# Altium footprint library Card Connectors.PcbLib: 16 footprints
Each footprint in its own frame and in the unit in brackets; x right, y up, seen from the top. Pads: shape width x height; smd on the part's side, far side on the other; paste and mask are expansions set on the pad; w line width, h text height; cw(c..) or ccw(c..) is an arc to the next point about the centre after c.
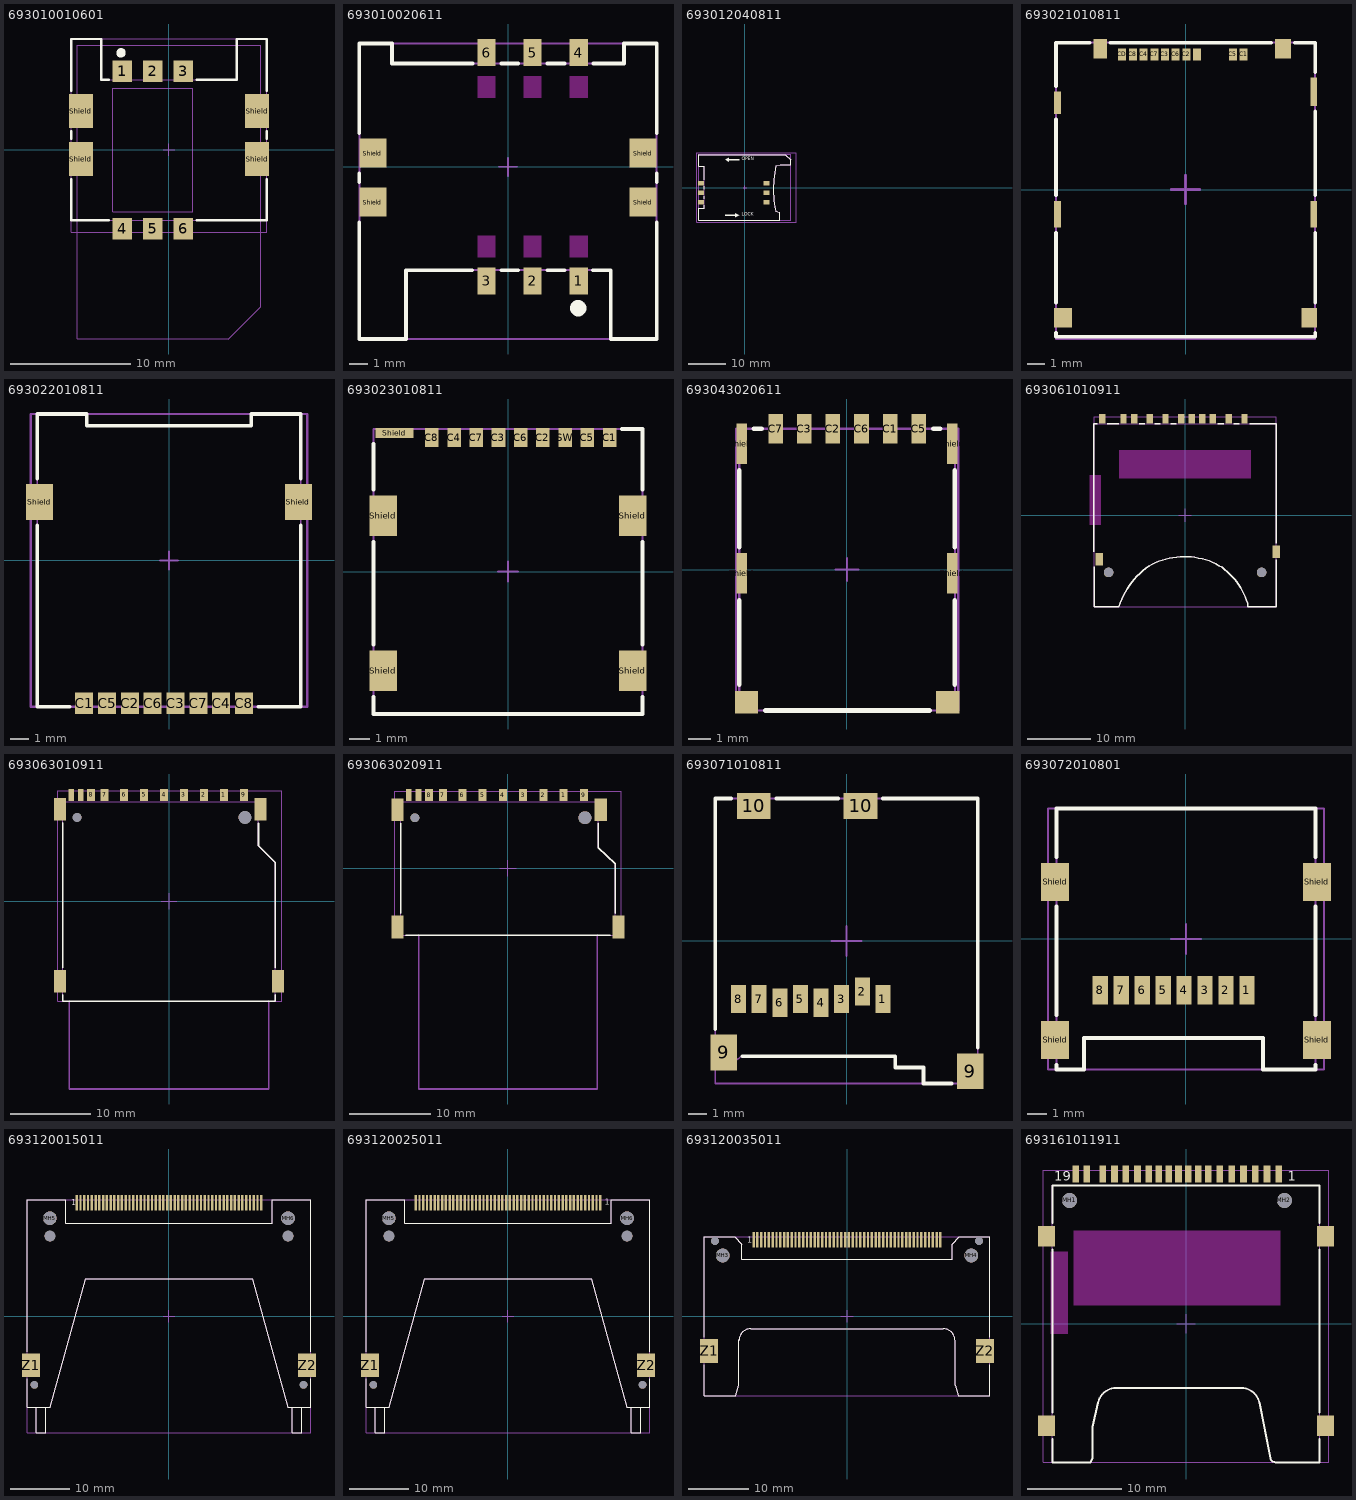
[diagram p0: the footprints below, top view; thin cyan lines are the x and y axes]

## 693010010601 [mm] "Mini SIM Card Connector Header"
height 1.7
pads (10):
  rect 1.6x1.8 smd: 1(-3.9,6.55) 2(-1.36,6.55) 3(1.18,6.55) 4(-3.9,-6.55) 5(-1.36,-6.55) 6(1.18,-6.55)
  rect 2x2.8 smd: Shield(-7.35,-0.75) Shield(-7.35,3.25) Shield(7.35,-0.75) Shield(7.35,3.25)
Top Overlay:
  circle w0.5: c-4,8.1 r0.141
  lines w0.2: -8.15,-2.45 -8.15,-5.85 -5,-5.85 ; -8.15,0.95 -8.15,1.55 ; -8.15,4.95 -8.15,9.25 -5.65,9.25 -5.65,5.85 -5,5.85 ; 2.3,-5.85 8.15,-5.85 8.15,-2.45 ; 2.3,5.85 5.65,5.85 5.65,9.25 8.15,9.25 8.15,4.95 ; 8.15,0.95 8.15,1.55
Mechanical 1:
  lines w0.1: -7.65,-15.75 -7.65,8.75 7.65,8.75 7.65,-13.05 4.95,-15.75 4.95,-15.75 ; -7.65,-15.75 -7.65,-15.75 ; -7.65,-15.75 4.95,-15.75 ; 4.95,-15.75 4.95,-15.75 ; -4.7,-5.15 1.98,-5.15 1.98,5.15 -4.7,5.15 -4.7,-5.15
  text "Via Limited Area" at -1,-4.5 h0.6
Mechanical 11:
  lines w0.1: -8.15,-5.85 -8.15,9.25 -5.65,9.25 -5.65,5.85 5.65,5.85 5.65,9.25 8.15,9.25 8.15,-5.85 -8.15,-5.85
Mechanical 13:
  lines w0.1: -8.15,-6.85 8.15,-6.85 8.15,9.25 -8.15,9.25 -8.15,-6.85
Mechanical 15:
  lines w0.1: -0.5,0 0.5,0 ; 0,-0.5 0,0.5
3D body "693010010601.stp": height 1.71, standoff -0.04, extent -8.15,-6.85 8.15,9.25

## 693010020611 [mm] "Mini SIM Card Connector Header Shielded"
height 1.8
pads (10):
  rect 1x1.5 smd: 1(3.9,-6.3) 2(1.36,-6.3) 3(-1.18,-6.3) 4(3.9,6.3) 5(1.36,6.3) 6(-1.18,6.3)
  rect 1.5x1.6 smd: Shield(-7.45,-1.95) Shield(-7.45,0.75) Shield(7.45,-1.95) Shield(7.45,0.75)
Top Layer keep-out:
  rectangle: 3.4,3.8 4.4,5
  rectangle: 0.86,3.8 1.86,5
  rectangle: -1.68,3.8 -0.68,5
  region: 4.4,-3.8 3.4,-3.8 3.4,-5 4.4,-5
  region: 1.86,-3.8 0.86,-3.8 0.86,-5 1.86,-5
  region: -0.68,-3.8 -1.68,-3.8 -1.68,-5 -0.68,-5
Top Overlay:
  circle w0.5: c3.87,-7.8 r0.2
  lines w0.2: -8.2,-3.05 -8.2,-9.5 -5.63,-9.5 -5.63,-5.7 -1.98,-5.7 ; -8.2,-0.85 -8.2,-0.35 ; -8.2,1.85 -8.2,6.8 -6.4,6.8 -6.4,5.7 -1.95,5.7 ; -0.38,-5.7 0.57,-5.7 ; -0.38,5.7 0.57,5.7 ; 2.17,-5.7 3.12,-5.7 ; 2.17,5.7 3.12,5.7 ; 4.67,-5.7 5.67,-5.7 5.67,-9.5 8.2,-9.5 8.2,-3.05 ; 4.7,5.7 6.4,5.7 6.4,6.8 8.2,6.8 8.2,1.85 ; 8.2,-0.85 8.2,-0.35
Mechanical 11:
  lines w0.1: -8.2,-9.5 -8.2,6.8 -6.4,6.8 -6.4,5.7 6.4,5.7 6.4,6.8 8.2,6.8 8.2,-9.5 5.67,-9.5 5.67,-5.7 -5.63,-5.7 -5.63,-9.5 ; -8.2,-9.5 -8.2,-9.5 ; -8.2,-9.5 -5.63,-9.5 ; -5.63,-9.5 -5.63,-9.5
Mechanical 13:
  lines w0.1: -8.2,-9.5 8.2,-9.5 ; -8.2,-9.5 -8.2,-9.5 ; -8.2,-9.5 -8.2,6.8 8.2,6.8 ; 8.2,-9.5 8.2,6.8 ; 8.2,-9.5 8.2,-9.5 ; 8.2,6.8 8.2,6.8
Mechanical 15:
  lines w0.1: -0.5,0 0.5,0 ; 0,-0.5 0,0.5
3D body "693010020611.stp": height 1.82, standoff -0.03, extent -8.2,-9.5 8.2,6.8

## 693012040811 [mm] "Mini SIM Card Connector, Hinge Type"
height 1.8
pads (6):
  rect 1.6x1.2 smd: C1(-11.75,-3.9) C2(-11.75,-1.36) C3(-11.75,1.18) C5(5.75,-3.9) C6(5.75,-1.36) C7(5.75,1.18)
Top Overlay:
  region: -5.3,7.4 -4.8,7.65 -4.3,7.9 -4.3,7.55 -1.55,7.55 -1.55,7.25 -4.3,7.25 -4.3,6.9 -4.8,7.4 -4.3,6.9
  region: -1.55,-7.4 -2.05,-7.65 -2.55,-7.9 -2.55,-7.55 -5.3,-7.55 -5.3,-7.25 -2.55,-7.25 -2.55,-6.9 -2.05,-7.4 -2.55,-6.9
  lines w0.2: -10.9,-4.77 -10.9,-5.52 -12.3,-5.52 -12.3,-8.8 9.25,-8.8 9.25,-6.55 8.255,-6.374 cw(c34.968,0.127) 7.994,-5.191 cw(c37.494,-0.397) 8.252,5.778 ; -10.9,-3.02 -10.9,-2.27 ; -10.9,-0.47 -10.9,0.28 ; -10.9,2.08 -10.9,5.62 -12.3,5.62 -12.3,8.8 10.85,8.8 12.302,7.397 12.302,6.148 9.45,6.148 8.251,5.781
  text "OPEN" at -0.9,6.9 h1.5
  text "LOCK" at -0.9,-7.9 h1.5
Mechanical 11:
  lines w0.1: -12.3,-8.8 -12.3,-5.52 -10.9,-5.52 -10.9,5.62 -12.3,5.62 -12.3,8.8 ; -12.28,-8.8 9.25,-8.8 9.25,-6.55 8.255,-6.374 cw(c34.968,0.127) 7.994,-5.191 cw(c37.494,-0.397) 8.252,5.778 ; -12.28,8.8 10.85,8.8 12.302,7.397 12.302,6.148 9.45,6.148 8.251,5.781
Mechanical 13:
  lines w0.1: -12.3,-8.8 12.3,-8.8 12.3,8.918 -12.3,8.918 -12.3,-8.8
Mechanical 15:
  lines w0.1: -0.5,0 0.5,0 ; 0,-0.5 0,0.5 ; -12.8,-9.35 -12.8,9.35 13.7,9.35 13.7,-9.35 -12.8,-9.35
3D body "693012040811.stp": height 1.85, standoff -0.04, extent -12.3,-8.8 12.3,8.918

## 693021010811 [mm] "Micro SIM Card Connector, Push & Push"
height 1.4
pads (18):
  rect 0.45x0.68 smd: C1(3.25,7.565) C2(0.05,7.565) C3(-1.15,7.565) C4(-2.35,7.565) C5(2.65,7.565) C6(-0.55,7.565) C7(-1.75,7.565) C8(-2.95,7.565) CD(-3.55,7.565) COM(0.65,7.565)
  rect 0.37x1.5 smd: Shield(-7.165,-1.375) Shield(7.165,-1.375)
  rect 0.37x1.25 smd: Shield(-7.165,4.85)
  rect 1x1.1 smd: Shield(-6.85,-7.175)
  rect 0.75x1.1 smd: Shield(-4.77,7.875)
  rect 0.9x1.1 smd: Shield(5.46,7.875)
  rect 0.85x1.1 smd: Shield(6.925,-7.175)
  rect 0.37x1.6 smd: Shield(7.165,5.485)
Top Overlay:
  lines w0.2: -7.25,-8.025 -7.25,-8.225 7.25,-8.225 7.25,-8.025 ; -7.25,-6.325 -7.25,-2.425 ; -7.25,-0.325 -7.25,3.925 ; -7.25,5.775 -7.25,8.225 -5.35,8.225 ; -4.2,8.225 4.8,8.225 ; 6.1,8.225 7.25,8.225 7.25,6.575 ; 7.25,-6.325 7.25,-2.425 ; 7.25,-0.325 7.25,4.375
Mechanical 11:
  lines w0.1: -7.25,8.225 -7.25,8.225 ; -7.25,8.225 -7.25,-8.225 7.25,-8.225 ; -7.25,8.225 7.25,8.225 7.25,-8.225 ; 7.25,-8.225 7.25,-8.225
Mechanical 13:
  lines w0.1: -7.25,-8.359 7.25,-8.359 7.25,8.225 -7.25,8.225 -7.25,-8.359
Mechanical 15:
  lines w0.15: -0.8,0 0.8,0 ; 0,-0.8 0,0.8
3D body "693021010811.stp": height 1.33, standoff -0.01, extent -7.25,-8.359 7.25,8.225

## 693022010811 [mm] "Micro SIM Card Connector, Hinge Type"
height 2
pads (10):
  rect 1x1.2 smd: C1(-4.72,-7.95) C2(-2.18,-7.95) C3(0.36,-7.95) C4(2.9,-7.95) C5(-3.45,-7.95) C6(-0.91,-7.95) C7(1.63,-7.95) C8(4.17,-7.95)
  rect 1.5x2 smd: Shield(-7.2,3.25) Shield(7.2,3.25)
Top Overlay:
  lines w0.2: -7.33,1.95 -7.33,-8.15 -5.53,-8.15 ; -7.33,4.55 -7.33,8.15 -4.58,8.15 -4.58,7.5 4.58,7.5 4.58,8.15 7.33,8.15 7.33,4.55 ; 4.97,-8.15 7.33,-8.15 7.33,1.95
Mechanical 11:
  lines w0.1: -7.33,-8.15 7.33,-8.15 7.33,8.15 4.58,8.15 4.58,7.5 -4.58,7.5 -4.58,8.15 -7.33,8.15 -7.33,-8.15
Mechanical 13:
  lines w0.127: -7.7,-8.15 7.7,-8.15 7.7,8.15 -7.7,8.15 -7.7,-8.15
Mechanical 15:
  lines w0.1: -0.5,0 0.5,0 ; 0,-0.5 0,0.5
3D body "693022010811.stp": height 2.09, standoff -0.04, extent -7.7,-8.16 7.7,8.14

## 693023010811 [mm] "Micro SIM Card Connector, Push & Pull"
height 1.27
pads (14):
  rect 0.67x0.95 smd: C1(5.03,6.625) C2(1.73,6.625) C3(-0.47,6.625) C4(-2.67,6.625) C5(3.93,6.625) C6(0.63,6.625) C7(-1.57,6.625) C8(-3.77,6.625) SW(2.83,6.625)
  rect 1.35x2 smd: Shield(-6.175,-4.9) Shield(-6.175,2.75) Shield(6.175,-4.9) Shield(6.175,2.75)
  rect 1.89x0.5 smd: Shield(-5.615,6.85)
Top Overlay:
  lines w0.2: -6.65,-6.2 -6.65,-7.05 6.65,-7.05 6.65,-6.2 ; -6.65,-3.6 -6.65,1.45 ; -6.65,4.05 -6.65,6.3 ; 5.65,7.05 6.65,7.05 6.65,4.05 ; 6.65,-3.6 6.65,1.45
Mechanical 11:
  lines w0.1: -6.65,-7.05 -6.65,7.05 6.65,7.05 6.65,-7.05 -6.65,-7.05
Mechanical 13:
  lines w0.1: -6.65,-7.05 6.65,-7.05 6.65,7.05 -6.65,7.05 -6.65,-7.05
Mechanical 15:
  lines w0.1: -0.5,0 0.5,0 ; 0,-0.5 0,0.5
3D body "693023010811.stp": height 1.3, standoff 0.03, extent -6.65,-7.05 6.65,7.05

## 693043020611 [mm] "Nano SIM Card Connector, Push & Pull"
height 1.3
pads (12):
  rect 0.65x1.3 smd: C1(1.915,6.25) C2(-0.625,6.25) C3(-1.895,6.25) C5(3.185,6.25) C6(0.645,6.25) C7(-3.165,6.25)
  rect 0.48x1.8 smd: Shield(-4.665,-0.17) Shield(-4.665,5.58) Shield(4.665,-0.17) Shield(4.665,5.58)
  rect 1.03x1 smd: Shield(-4.46,-5.89) Shield(4.47,-5.89)
Top Overlay:
  lines w0.2: -4.775,-5.1 -4.775,-1.35 ; -4.775,1 -4.775,4.4 ; -4.125,6.25 -3.775,6.25 ; -3.625,-6.25 3.675,-6.25 ; 3.825,6.25 4.125,6.25 ; 4.785,-5.1 4.785,-1.35 ; 4.785,1 4.785,4.4
Mechanical 11:
  lines w0.1: -4.775,-6.25 4.785,-6.25 4.785,6.25 -4.775,6.25 -4.775,-6.25
Mechanical 13:
  lines w0.1: -4.926,-6.25 4.936,-6.25 4.936,6.25 -4.926,6.25 -4.926,-6.25
Mechanical 15:
  lines w0.1: -0.5,0 0.5,0 ; 0,-0.5 0,0.5
3D body "693043020611.stp": height 1.2, standoff -0.01, extent -4.926,-6.25 4.936,6.25

## 693061010911 [mm] "SD Card Connector, Push & Push"
height 2.9
pads (15):
  rect 1x1.5 smd: 1(6.9,15.26) 2(4.4,15.26) 3(1.05,15.26) 4(-0.6,15.26) 5(-3.1,15.26) 6(-5.6,15.26) 7(-8.03,15.26) 8(-9.73,15.26) 9(9.4,15.26) CD(2.7,15.26) WP(-13.08,15.26)
  round 1.5 hole 1.5 unplated: MH1(-12.1,-9.05) MH2(12.1,-9.05)
  rect 1.2x2 smd: Shield(-13.6,-6.95) Shield(14.4,-5.75)
Top Layer keep-out:
  rectangle: -10.41,5.8 10.42,10.3
  rectangle: -15.1,-1.55 -13.3,6.4
Top Overlay:
  lines w0.2: -14.45,-5.75 -14.45,14.45 -13.85,14.45 ; -14.4,-8.15 -14.4,-14.45 -10.5,-14.45 cw(c1.7,-18.565) -5.714,-8.039 cw(c-0.104,-17.856) 5.867,-8.253 cw(c-0.726,-17.21) 9.893,-13.905 ; -12.3,14.45 -10.5,14.45 ; -7.25,14.45 -6.4,14.45 ; -4.8,14.45 -3.9,14.45 ; -2.3,14.45 -1.4,14.45 ; 5.2,14.45 6.1,14.45 ; 7.7,14.45 8.6,14.45 ; 9.9,-13.902 9.9,-14.45 14.4,-14.45 14.4,-7.05 ; 10.2,14.45 14.4,14.45 14.4,-4.45
Mechanical 11:
  lines w0.1: 9.893,-13.905 ccw(c-0.726,-17.21) 5.867,-8.253 ccw(c-0.104,-17.856) -5.714,-8.039 ccw(c1.7,-18.565) -10.5,-14.45 -14.4,-14.45 -14.4,14.45 14.4,14.45 14.4,-14.45 9.9,-14.45 9.9,-13.902
Mechanical 13:
  lines w0.1: -14.4,-14.45 14.4,-14.45 14.4,15.6 -14.4,15.6 -14.4,-14.45
Mechanical 15:
  lines w0.1: -1,0 1,0 ; 0,-1 0,1
3D body "693061010911.stp": height 2.94, standoff -0.46, extent -14.4,-14.45 14.4,15.6

## 693063010911 [mm] "SD Card Connector, Push & Pull"
height 3.3
pads (17):
  rect 1x1.5 smd: 1(6.875,13.3) 2(4.375,13.3) 3(1.875,13.3) 4(-0.625,13.3) 5(-3.125,13.3) 6(-5.625,13.3) 7(-8.05,13.3) 8(-9.75,13.3) 9(9.375,13.3)
  rect 0.7x1.5 smd: CD(-11.05,13.3) WP(-12.25,13.3)
  round 1.1 hole 1.1 unplated: MH1(-11.5,10.5)
  round 1.6 hole 1.6 unplated: MH2(9.5,10.5)
  rect 1.5x2.8 smd: Shield(-13.65,-10) Shield(-13.65,11.5) Shield(11.45,11.5) Shield(13.65,-10)
Top Overlay:
  lines w0.2: -13.3,-11.7 -13.3,-12.5 13.3,-12.5 13.3,-11.7 ; -13.3,-8.3 -13.3,9.8 ; 11.2,9.78 11.2,6.95 13.3,4.85 13.3,-8.3
Mechanical 1:
  lines w0.2: -12.5,-12.5 -12.5,-23.5 12.5,-23.5 12.5,-12.5
  text "Card Position" at -7,-19 h2.5
Mechanical 11:
  lines w0.1: -13.3,-12.5 -13.3,12.48 11.2,12.48 11.2,6.95 13.3,4.85 13.3,-12.5 -13.3,-12.5
Mechanical 13:
  lines w0.1: -13.95,-12.5 14.094,-12.5 14.094,13.8 -13.95,13.8 -13.95,-12.5
Mechanical 15:
  lines w0.1: -1,0 1,0 ; 0,-1 0,1
3D body "693063010911.stp": height 3.33, standoff -0.77, extent -13.95,-12.5 14.094,13.8

## 693063020911 [mm] "SD Card Connector, Push & Pull - Short Type"
height 2.8
pads (17):
  rect 1x1.5 smd: 1(6.875,9.05) 2(4.375,9.05) 3(1.875,9.05) 4(-0.625,9.05) 5(-3.125,9.05) 6(-5.625,9.05) 7(-8.05,9.05) 8(-9.75,9.05) 9(9.375,9.05)
  rect 0.7x1.5 smd: CD(-11.05,9.05) WP(-12.25,9.05)
  round 1.1 hole 1.1 unplated: MH1(-11.5,6.25)
  round 1.6 hole 1.6 unplated: MH2(9.5,6.25)
  rect 1.5x2.8 smd: Shield(-13.65,-7.25) Shield(-13.65,7.25) Shield(11.45,7.25) Shield(13.65,-7.25)
Top Overlay:
  lines w0.2: -13.25,-5.55 -13.25,5.55 ; -12.6,-8.25 12.6,-8.25 ; 11.15,5.55 11.15,2.55 13.254,0.554 13.254,-5.546
Mechanical 1:
  lines w0.2: -11,-8.25 -11,-27.25 11,-27.25 11,-8.25
  text "SD CARD" at -5,-18.05 h2.5
Mechanical 11:
  lines w0.1: 13.25,0.55 13.25,-8.25 -13.25,-8.25 -13.25,8.25 11.15,8.25 11.15,2.55 13.254,0.554
Mechanical 13:
  lines w0.1: -14,-8.247 14,-8.247 14,9.503 -14,9.503 -14,-8.247
Mechanical 15:
  lines w0.1: -1,0 1,0 ; 0,-1 0,1
3D body "693063020911.stp": height 2.82, standoff -0.83, extent -14,-8.247 14,9.503

## 693071010811 [mm] "Micro SD Card Connector, Push & Push"
height 1.98
pads (12):
  rect 0.8x1.5 smd: 1(1.94,-3.1) 2(0.84,-2.7) 3(-0.26,-3.1) 4(-1.36,-3.3) 5(-2.46,-3.1) 6(-3.56,-3.3) 7(-4.66,-3.1) 8(-5.76,-3.1)
  rect 1.4x1.9 smd: 9(-6.55,-5.95) 9(6.6,-6.95)
  rect 1.8x1.4 smd: 10(-4.95,7.2) 10(0.75,7.2)
Top Overlay:
  lines w0.2: -7,-4.7 -7,7.6 -6.15,7.6 ; -5.55,-6.15 2.6,-6.15 2.6,-6.75 4.1,-6.75 4.1,-7.6 5.6,-7.6 ; -3.75,7.6 -0.45,7.6 ; 1.95,7.6 7,7.6 7,-5.7
Mechanical 11:
  lines w0.1: -6.2,-6.6 -7,-6.6 -7,7.6 7,7.6 7,-7.6 4.1,-7.6 4.1,-6.75 2.6,-6.75 2.6,-6.15 -5.6,-6.15 -6.199,-6.601
Mechanical 13:
  lines w0.1: -7,-7.61 7,-7.61 7,7.6 -7,7.6 -7,-7.61
Mechanical 15:
  lines w0.1: -0.8,0 0.8,0 ; 0,-0.8 0,0.8
3D body "693071010811.stp": height 1.85, standoff -0.05, extent -7,-7.61 7,7.6

## 693072010801 [mm] "Micro SD Card Connector, Hinge Type"
height 1.95
pads (12):
  rect 0.8x1.5 smd: 1(3.2,-2.7) 2(2.1,-2.7) 3(1,-2.7) 4(-0.1,-2.7) 5(-1.2,-2.7) 6(-2.3,-2.7) 7(-3.4,-2.7) 8(-4.5,-2.7)
  rect 1.45x2 smd: Shield(-6.875,-5.3) Shield(-6.875,3) Shield(6.875,-5.3) Shield(6.875,3)
Top Overlay:
  lines w0.2: -6.8,-6.6 -6.8,-6.85 -5.35,-6.85 -5.35,-5.2 4.05,-5.2 4.05,-6.85 6.8,-6.85 6.8,-6.6 ; -6.8,-4 -6.8,1.7 ; -6.8,4.3 -6.8,6.85 6.8,6.85 6.8,4.3 ; 6.8,-4 6.8,1.7
Mechanical 11:
  lines w0.1: -6.8,-6.85 -6.8,6.85 6.8,6.85 6.8,-6.85 4.05,-6.85 4.05,-5.2 -5.35,-5.2 -5.35,-6.85 -6.8,-6.85
Mechanical 13:
  lines w0.1: -7.25,-6.85 7.25,-6.85 7.25,6.85 -7.25,6.85 -7.25,-6.85
Mechanical 15:
  lines w0.1: -0.8,0 0.8,0 ; 0,-0.8 0,0.8
3D body "693072010801.stp": height 1.79, standoff 0.02, extent -7.25,-6.85 7.25,6.85

## 693120015011 [mm] "Compact Flash Card Connector Header"
height 7.05
pads (58):
  rect 0.4x2.6 smd: 1(-15.557,19.145) 2(-14.287,19.145) 3(-13.018,19.145) 4(-11.747,19.145) 5(-10.477,19.145) 6(-9.207,19.145) 7(-7.938,19.145) 8(-6.667,19.145) 9(-5.397,19.145) 10(-4.127,19.145) 11(-2.857,19.145) 12(-1.587,19.145) 13(-0.318,19.145) 14(0.953,19.145) 15(2.222,19.145) 16(3.492,19.145) 17(4.763,19.145) 18(6.032,19.145) 19(7.302,19.145) 20(8.572,19.145) 21(9.842,19.145) 22(11.112,19.145) 23(12.383,19.145) 24(13.652,19.145) 25(14.922,19.145) 26(-14.922,19.145) 27(-13.652,19.145) 28(-12.383,19.145) 29(-11.112,19.145) 30(-9.842,19.145) 31(-8.572,19.145) 32(-7.302,19.145) 33(-6.032,19.145) 34(-4.763,19.145) 35(-3.492,19.145) 36(-2.222,19.145) 37(-0.953,19.145) 38(0.318,19.145) 39(1.587,19.145) 40(2.857,19.145) 41(4.127,19.145) 42(5.397,19.145) 43(6.667,19.145) 44(7.938,19.145) 45(9.207,19.145) 46(10.477,19.145) 47(11.747,19.145) 48(13.018,19.145) 49(14.287,19.145) 50(15.557,19.145)
  round 1.3 hole 1.3 unplated: MH1(-22.7,-11.555) MH2(22.7,-11.555)
  round 1.8 hole 1.8 unplated: MH3(-20.08,13.545) MH4(20.08,13.545)
  round 2.3 hole 2.3 unplated: MH5(-20.08,16.545) MH6(20.08,16.545)
  rect 3x4 smd: Z1(-23.295,-8.255) Z2(23.3,-8.255)
Top Overlay:
  lines w0.2: -23.9,-10.555 -23.9,-15.355 -20,-15.355 -14.019,6.355 ; -23.9,-5.955 -23.9,19.645 -17.45,19.645 -17.45,15.745 17.45,15.745 17.45,19.645 23.9,19.645 23.9,-5.955 ; -22.35,-15.355 -22.35,-19.645 -20.75,-19.645 -20.75,-15.355 ; -14.019,6.355 14.019,6.355 ; 14.019,6.355 20,-15.355 23.9,-15.355 23.9,-10.555 ; 20.75,-15.355 20.75,-19.645 22.35,-19.645 22.35,-15.355
  text "1" at -16.5,18.7 h1
Mechanical 11:
  lines w0.1: -22.35,-15.355 -22.35,-19.645 -20.75,-19.645 -20.75,-15.355 ; -14.019,6.355 14.019,6.355 ; -14.019,6.355 -20,-15.355 -23.9,-15.355 -23.9,19.645 -17.45,19.645 -17.45,15.745 17.45,15.745 17.45,19.645 23.9,19.645 23.9,-15.355 20,-15.355 14.019,6.355 ; 20.75,-15.355 20.75,-19.645 22.35,-19.645 22.35,-15.355
Mechanical 13:
  lines w0.1: -23.9,-19.645 23.9,-19.645 23.9,19.68 -23.9,19.68 -23.9,-19.645
Mechanical 15:
  lines w0.1: -1,0 1,0 ; 0,-1 0,1
3D body "693120015011.stp": height 6.32, standoff -0.73, extent -23.9,-19.645 23.9,19.68

## 693120025011 [mm] "Compact Flash Card Connector Header, Reverse type"
height 6.3
pads (58):
  rect 0.4x2.6 smd: 1(15.557,19.145) 2(14.287,19.145) 3(13.018,19.145) 4(11.747,19.145) 5(10.477,19.145) 6(9.207,19.145) 7(7.938,19.145) 8(6.667,19.145) 9(5.397,19.145) 10(4.127,19.145) 11(2.857,19.145) 12(1.587,19.145) 13(0.318,19.145) 14(-0.953,19.145) 15(-2.222,19.145) 16(-3.492,19.145) 17(-4.763,19.145) 18(-6.032,19.145) 19(-7.302,19.145) 20(-8.572,19.145) 21(-9.842,19.145) 22(-11.112,19.145) 23(-12.383,19.145) 24(-13.652,19.145) 25(-14.922,19.145) 26(14.922,19.145) 27(13.652,19.145) 28(12.383,19.145) 29(11.112,19.145) 30(9.842,19.145) 31(8.572,19.145) 32(7.302,19.145) 33(6.032,19.145) 34(4.763,19.145) 35(3.492,19.145) 36(2.222,19.145) 37(0.953,19.145) 38(-0.318,19.145) 39(-1.587,19.145) 40(-2.857,19.145) 41(-4.127,19.145) 42(-5.397,19.145) 43(-6.667,19.145) 44(-7.938,19.145) 45(-9.207,19.145) 46(-10.477,19.145) 47(-11.747,19.145) 48(-13.018,19.145) 49(-14.287,19.145) 50(-15.557,19.145)
  round 1.3 hole 1.3 unplated: MH1(-22.7,-11.555) MH2(22.7,-11.555)
  round 1.8 hole 1.8 unplated: MH3(-20.08,13.545) MH4(20.08,13.545)
  round 2.3 hole 2.3 unplated: MH5(-20.08,16.545) MH6(20.08,16.545)
  rect 3x4 smd: Z1(-23.295,-8.255) Z2(23.3,-8.255)
Top Overlay:
  lines w0.2: -23.9,-10.555 -23.9,-15.355 -20,-15.355 -14.019,6.355 ; -23.9,-5.955 -23.9,19.645 -17.45,19.645 -17.45,15.745 17.45,15.745 17.45,19.645 23.9,19.645 23.9,-5.955 ; -22.35,-15.355 -22.35,-19.645 -20.75,-19.645 -20.75,-15.355 ; -14.019,6.355 14.019,6.355 ; 14.019,6.355 20,-15.355 23.9,-15.355 23.9,-10.555 ; 20.75,-15.355 20.75,-19.645 22.35,-19.645 22.35,-15.355
  text "1" at 16.3,18.8 h1
Mechanical 11:
  lines w0.1: -22.35,-15.355 -22.35,-19.645 -20.75,-19.645 -20.75,-15.355 ; -14.019,6.355 14.019,6.355 ; -14.019,6.355 -20,-15.355 -23.9,-15.355 -23.9,19.645 -17.45,19.645 -17.45,15.745 17.45,15.745 17.45,19.645 23.9,19.645 23.9,-15.355 20,-15.355 14.019,6.355 ; 20.75,-15.355 20.75,-19.645 22.35,-19.645 22.35,-15.355
Mechanical 13:
  lines w0.1: -23.9,-19.645 -23.9,19.68 23.9,19.68 23.9,-19.645 -23.9,-19.645
Mechanical 15:
  lines w0.1: -1,0 1,0 ; 0,-1 0,1
3D body "693120025011.stp": height 6.32, standoff -0.73, extent -23.9,-19.645 23.9,19.691

## 693120035011 [mm] "Compact Flash Card Connector Header, Shrouded type"
height 6.8
pads (56):
  rect 0.4x2.6 smd: 1(-15.558,12.75) 2(-14.288,12.75) 3(-13.018,12.75) 4(-11.748,12.75) 5(-10.478,12.75) 6(-9.208,12.75) 7(-7.938,12.75) 8(-6.668,12.75) 9(-5.398,12.75) 10(-4.128,12.75) 11(-2.858,12.75) 12(-1.588,12.75) 13(-0.318,12.75) 14(0.952,12.75) 15(2.222,12.75) 16(3.492,12.75) 17(4.762,12.75) 18(6.032,12.75) 19(7.302,12.75) 20(8.572,12.75) 21(9.842,12.75) 22(11.112,12.75) 23(12.382,12.75) 24(13.652,12.75) 25(14.922,12.75) 26(-14.923,12.75) 27(-13.653,12.75) 28(-12.383,12.75) 29(-11.113,12.75) 30(-9.843,12.75) 31(-8.573,12.75) 32(-7.303,12.75) 33(-6.033,12.75) 34(-4.763,12.75) 35(-3.493,12.75) 36(-2.223,12.75) 37(-0.953,12.75) 38(0.317,12.75) 39(1.587,12.75) 40(2.857,12.75) 41(4.127,12.75) 42(5.397,12.75) 43(6.667,12.75) 44(7.937,12.75) 45(9.207,12.75) 46(10.477,12.75) 47(11.747,12.75) 48(13.017,12.75) 49(14.287,12.75) 50(15.557,12.75)
  round 1.3 hole 1.3 unplated: MH1(-22,12.55) MH2(22,12.55)
  round 2.3 hole 2.3 unplated: MH3(-20.7,10.15) MH4(20.7,10.15)
  rect 3x4 smd: Z1(-22.98,-5.75) Z2(22.98,-5.75)
Top Overlay:
  lines w0.2: -23.8,-8.05 -23.8,-13.25 -18.5,-13.25 ; -23.8,-3.45 -23.8,13.25 -18.7,13.25 -17.5,12.05 -17.5,9.55 17.5,9.55 17.5,12.05 18.7,13.25 23.8,13.25 23.8,-3.45 ; -18.502,-13.249 -18,-11.45 -18,-3.85 ; -18,-4.05 cw(c-16,-4.05) -16,-2.05 16,-2.05 cw(c16,-4.05) 18,-4.05 18,-11.45 18.502,-13.249 ; 18.5,-13.25 23.8,-13.25 23.8,-8.05
  text "1" at -16.6,12.3 h1
Mechanical 11:
  lines w0.1: -18.502,-13.249 -18,-11.45 -18,-3.85 ; -18.5,-13.25 -23.8,-13.25 -23.8,13.25 -18.7,13.25 -17.5,12.05 -17.5,9.55 17.5,9.55 17.5,12.05 18.7,13.25 23.8,13.25 23.8,-13.25 18.5,-13.25 ; -18,-4.05 cw(c-16,-4.05) -16,-2.05 16,-2.05 cw(c16,-4.05) 18,-4.05 18,-11.45 18.502,-13.249
Mechanical 13:
  lines w0.1: -23.8,13.25 -23.8,-13.25 23.8,-13.25 23.8,13.25 ; -23.8,13.25 -23.8,13.25 ; -23.8,13.25 23.8,13.25 ; 23.8,13.25 23.8,13.25
Mechanical 15:
  lines w0.1: -1,0 1,0 ; 0,-1 0,1
3D body "693120035011.stp": height 6.82, standoff -0.58, extent -23.8,-13.25 23.8,13.25

## 693161011911 [mm] "SD Card Connector 4.0, Push & Push"
height 3
pads (25):
  rect 0.7x1.8 smd: 1(9.85,15.9) 2(8.6,15.9) 3(7.35,15.9) 4(6.1,15.9) 5(4.85,15.9) 6(3.6,15.9) 7(2.35,15.9) 8(1.3,15.9) 9(0.25,15.9) 10(-0.8,15.9) 11(-1.84,15.9) 12(-2.9,15.9) 13(-3.94,15.9) 14(-5.15,15.9) 15(-6.39,15.9) 16(-7.59,15.9) 17(-8.82,15.9) 18(-10.52,15.9) 19(-11.72,15.9)
  round 1.6 hole 1.6 unplated: MH1(-12.35,13.1) MH2(10.45,13.1)
  rect 1.8x2.2 smd: Shield(-14.825,-10.8) Shield(-14.825,9.3) Shield(14.825,-10.8) Shield(14.825,9.3)
Top Layer keep-out:
  rectangle: -14.375,-1.1 -12.525,7.7
  rectangle: -11.935,1.96 10.025,9.9
Top Overlay:
  lines w0.2: -14.175,-12.2 -14.175,-14.7 -10.125,-14.7 ; -14.175,-9.4 -14.175,7.9 ; -14.175,10.7 -14.175,14.7 14.175,14.7 14.175,10.7 ; -10.125,-14.7 -9.925,-14.25 -9.925,-10.95 ; -9.92,-10.951 -9.333,-8.348 cw(c-7.385,-8.8) -7.186,-6.81 5.646,-6.81 cw(c5.845,-8.8) 7.793,-8.348 8.954,-14.267 ; 8.946,-14.268 ccw(c9.546,-14.068) 9.575,-14.7 14.175,-14.7 14.175,-12.2 ; 14.175,-9.4 14.175,7.9
  text "1" at 10.8,15.2 h1
  text "19" at -14,15.2 h1
Mechanical 11:
  lines w0.1: -10.125,-14.7 -9.925,-14.25 -9.925,-10.95 ; -10.125,-14.7 -14.175,-14.7 -14.175,14.7 14.175,14.7 14.175,-14.7 9.575,-14.7 cw(c9.546,-14.068) 8.946,-14.268 ; -9.92,-10.951 -9.333,-8.348 cw(c-7.385,-8.8) -7.186,-6.81 5.646,-6.81 cw(c5.845,-8.8) 7.793,-8.348 8.954,-14.267
Mechanical 13:
  lines w0.1: -15.175,-14.7 15.175,-14.7 15.175,16.3 -15.175,16.3 -15.175,-14.7
Mechanical 15:
  lines w0.1: -1,0 1,0 ; 0,-1 0,1
3D body "693161011911.stp": height 3.05, standoff -0.75, extent -15.175,-14.7 15.175,16.3